# Altium schematic symbol library CAP,CER,10nF,1%,25V,C0G,0603.Schlib: 1 symbol
Pins are listed as number, name and electrical type; pins without a type are passive.

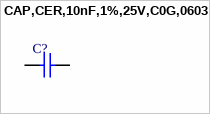
[diagram p0: symbol CAP,CER,10nF,1%,25V,C0G,0603]

## CAP,CER,10nF,1%,25V,C0G,0603
designator C?
pins: 1, 2